# Altium footprint library LED_MP-2016-1100-50-70.PcbLib: 1 footprints
Each footprint in its own frame and in the unit in brackets; x right, y up, seen from the top. Pads: shape width x height; smd on the part's side, far side on the other; paste and mask are expansions set on the pad; w line width, h text height; cw(c..) or ccw(c..) is an arc to the next point about the centre after c.
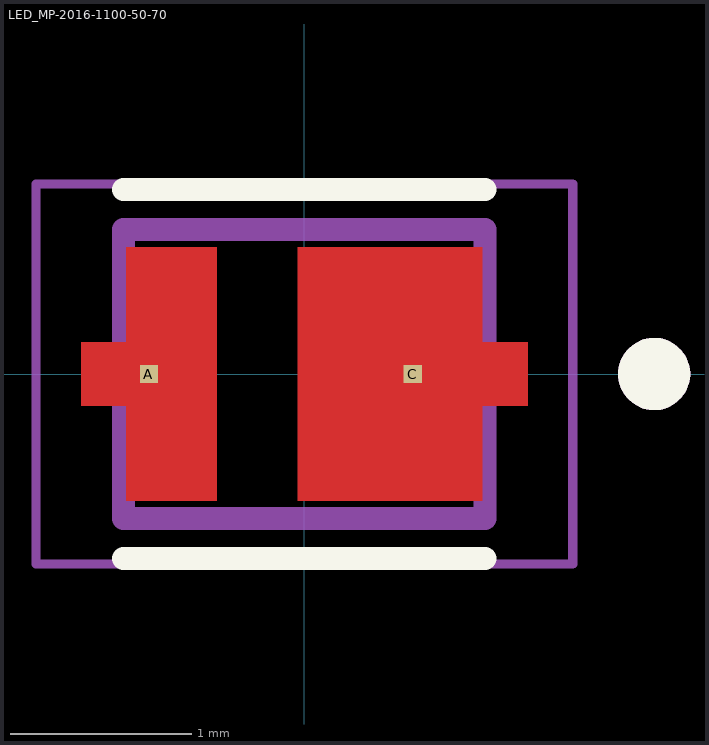
[diagram p0: the footprint, top view; thin cyan lines are the x and y axes]

## LED_MP-2016-1100-50-70 [mm]
pads (2):
  rect 0.1x0.1 smd paste-1 mask+0: A(-0.86,0) C(0.6,0)
Top Layer:
  region: -0.485,-0.7 -0.985,-0.7 -0.985,-0.175 -1.235,-0.175 -1.235,0.175 -0.985,0.175 -0.985,0.7 -0.485,0.7
  region: 0.985,0.175 1.235,0.175 1.235,-0.175 0.985,-0.175 0.985,-0.7 -0.035,-0.7 -0.035,0.7 0.985,0.7
Top Overlay:
  circle w0.2: c1.935,0 r0.1
  lines w0.127: -1,-1.02 1,-1.02 ; -1,1.02 1,1.02
Top Paste:
  region: -0.485,-0.5 -0.985,-0.5 -0.985,0.5 -0.485,0.5
  region: 0.965,-0.5 -0.035,-0.5 -0.035,0.5 0.965,0.5
Top Solder:
  region: -0.385,-0.8 -1.085,-0.8 -1.085,-0.275 -1.335,-0.275 -1.335,0.275 -1.085,0.275 -1.085,0.8 -0.385,0.8
  region: 1.085,0.275 1.335,0.275 1.335,-0.275 1.085,-0.275 1.085,-0.8 -0.135,-0.8 -0.135,0.8 1.085,0.8
Mechanical 13:
  circle w0.2: c1.935,0 r0.1
  lines w0.127: -1,-0.8 -1,0.8 1,0.8 1,-0.8 -1,-0.8
Mechanical 15:
  lines w0.05: -1.485,-1.05 -1.485,1.05 1.485,1.05 1.485,-1.05 -1.485,-1.05
3D body "step_temp.STEP": height 0.51, standoff -0.01, extent -0.978,-0.752 1.022,0.848